# Altium schematic symbol library ERA6AEB104V.SchLib: 1 symbol
Pins are listed as number, name and electrical type; pins without a type are passive.

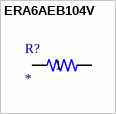
[diagram p0: symbol ERA6AEB104V]

## ERA6AEB104V
designator R?
100 kOhms ±0.1% 0.125W, 1/8W Chip Resistor 0805 (2012 Metric) Automotive AEC-Q200 Thin Film; MP: ERA6AEB104V; Price: None; Value: *; Availability: Unavailable; Package: None
footprint RES_ERA6AEB104V
pins: 1, 2